# Altium schematic symbol library UCP.SchLib: 378 symbols (part 13 of 14)
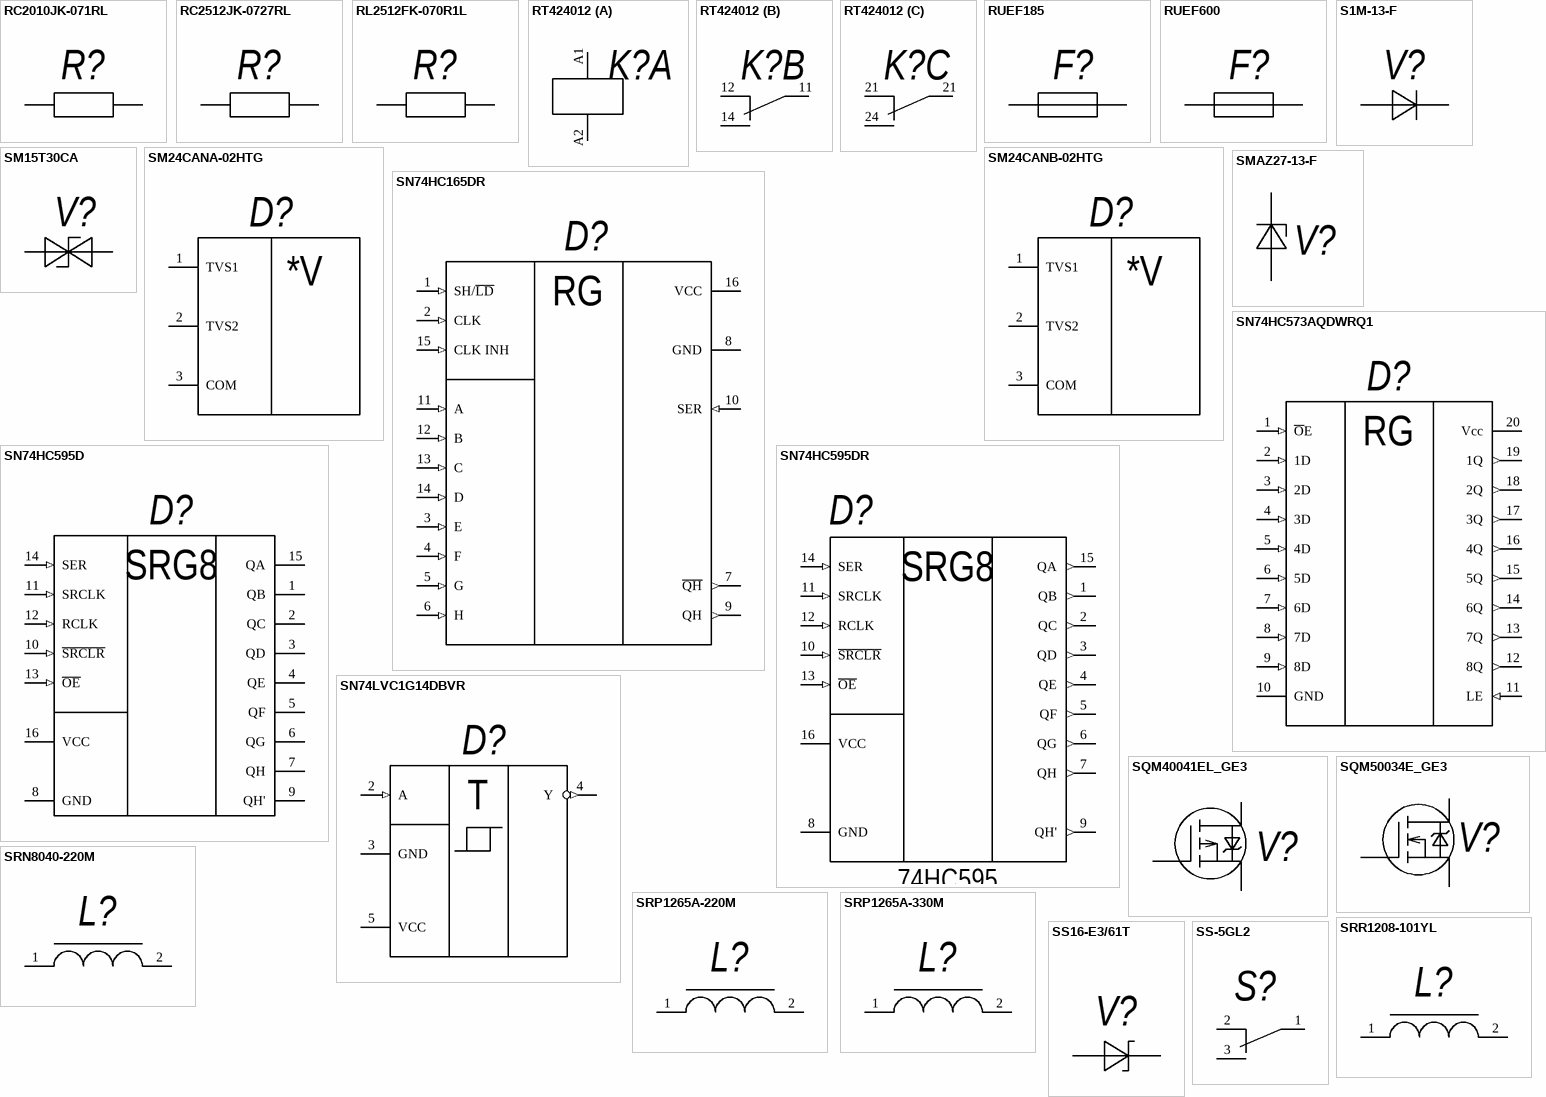
[diagram p36: symbols RC2010JK-071RL to SS-5GL2]

## SRR1208-101YL
designator L?  (value not drawn)
Shielded High Power Inductors / 100 uH, 1,5 A; Type: Катушка индуктивности; Supplier 1: Digi-Key; Supplier Part Number 1: SRR1208-101YLCT-ND; Case/Package: SMD-2; Mount: SMT; Value: SRR1208
footprint INDM1270X1270X850L230X500N (Inductor, Molded Body; 12.70 mm L X 12.70 mm W X 8.50 mm H body)
pins: 1 "Назначение вывода", 2 "Назначение вывода"

## SS16-E3/61T
designator V?  (value not drawn)
Surface-Mount Schottky Barrier Rectifier; Value: SS16; Supplier 1: Digi-Key; Supplier 2: Mouser; Supplier Part Number 1: SS16-E3/61TGICT-ND; Supplier Part Number 2: 625-SS16-E3; Case/Package: SMA(DO-214AC); Mount: SMT; Type: Диод
footprint DIOM521X260X220L114X145N (Diode, Molded Body; 4.315 mm L X 2.605 mm W X 2.20 mm H body)
footprint DIOM521X266X229L114X145N (Diode, Molded Body; 4.315 mm L X 2.605 mm W X 2.29 mm H body)
pins: A, C

## SS-5GL2
designator S?  (value not drawn)
Snap Action Switch N.O./N.C. SPDT Simulated Roller Lever Quick Connect 5A 125VAC Screw Mount; Manufacturer 1: Omron; Manufacturer Part Number 1: SS-5GL2T; Supplier 1: Mouser; Supplier Part Number 1: 653-SS-5GL2T; RoHS: Yes; Category: Snap Action / Limit Switches; Stock 1: 135; Pricing 1: 1=3,34000, 10=3,16000, 25=2,87000, 50=2,87000, 100=2,49000, 250=2,39000, 500=2,25000, 1000=2,25000, 10000=2,25000 (USD); ComponentLink1URL: https://datasheet.ciiva.com/2890/ss-1110-2890905.pdf?src-supplier=Digi-Key; ComponentLink1Description: https://datasheet.ciiva.com/2890/ss-1110-2890905.pdf?src-supplier=Digi-Key; ComponentLink2URL: https://datasheet.ciiva.com/8623/ss-1110-8623258.pdf?src-supplier=Avnet; ComponentLink2Description: https://datasheet.ciiva.com/8623/ss-1110-8623258.pdf?src-supplier=Avnet; ComponentLink3URL: https://datasheet.ciiva.com/14143/03572401-14143401.pdf?src-supplier=Distrelec; ComponentLink3Description: https://datasheet.ciiva.com/14143/03572401-14143401.pdf?src-supplier=Distrelec; ComponentLink4URL: https://datasheet.ciiva.com/16178/ss-1110-16178518.pdf?src-supplier=Onlinecomponents.com; ComponentLink4Description: https://datasheet.ciiva.com/16178/ss-1110-16178518.pdf?src-supplier=Onlinecomponents.com; ComponentLink5URL: https://datasheet.ciiva.com/14536/70175363-14536908.pdf?src-supplier=Allied+Electronics; ComponentLink5Description: https://datasheet.ciiva.com/14536/70175363-14536908.pdf?src-supplier=Allied+Electronics; Case/Package: DIP-3; Mount: THT; Type: Контакт концевой; Value: SS-5GL2
footprint OMRON_SS-5GL2
pins: 1 C "Назначение вывода", 2 NC "Назначение вывода", 3 NO "Назначение вывода"

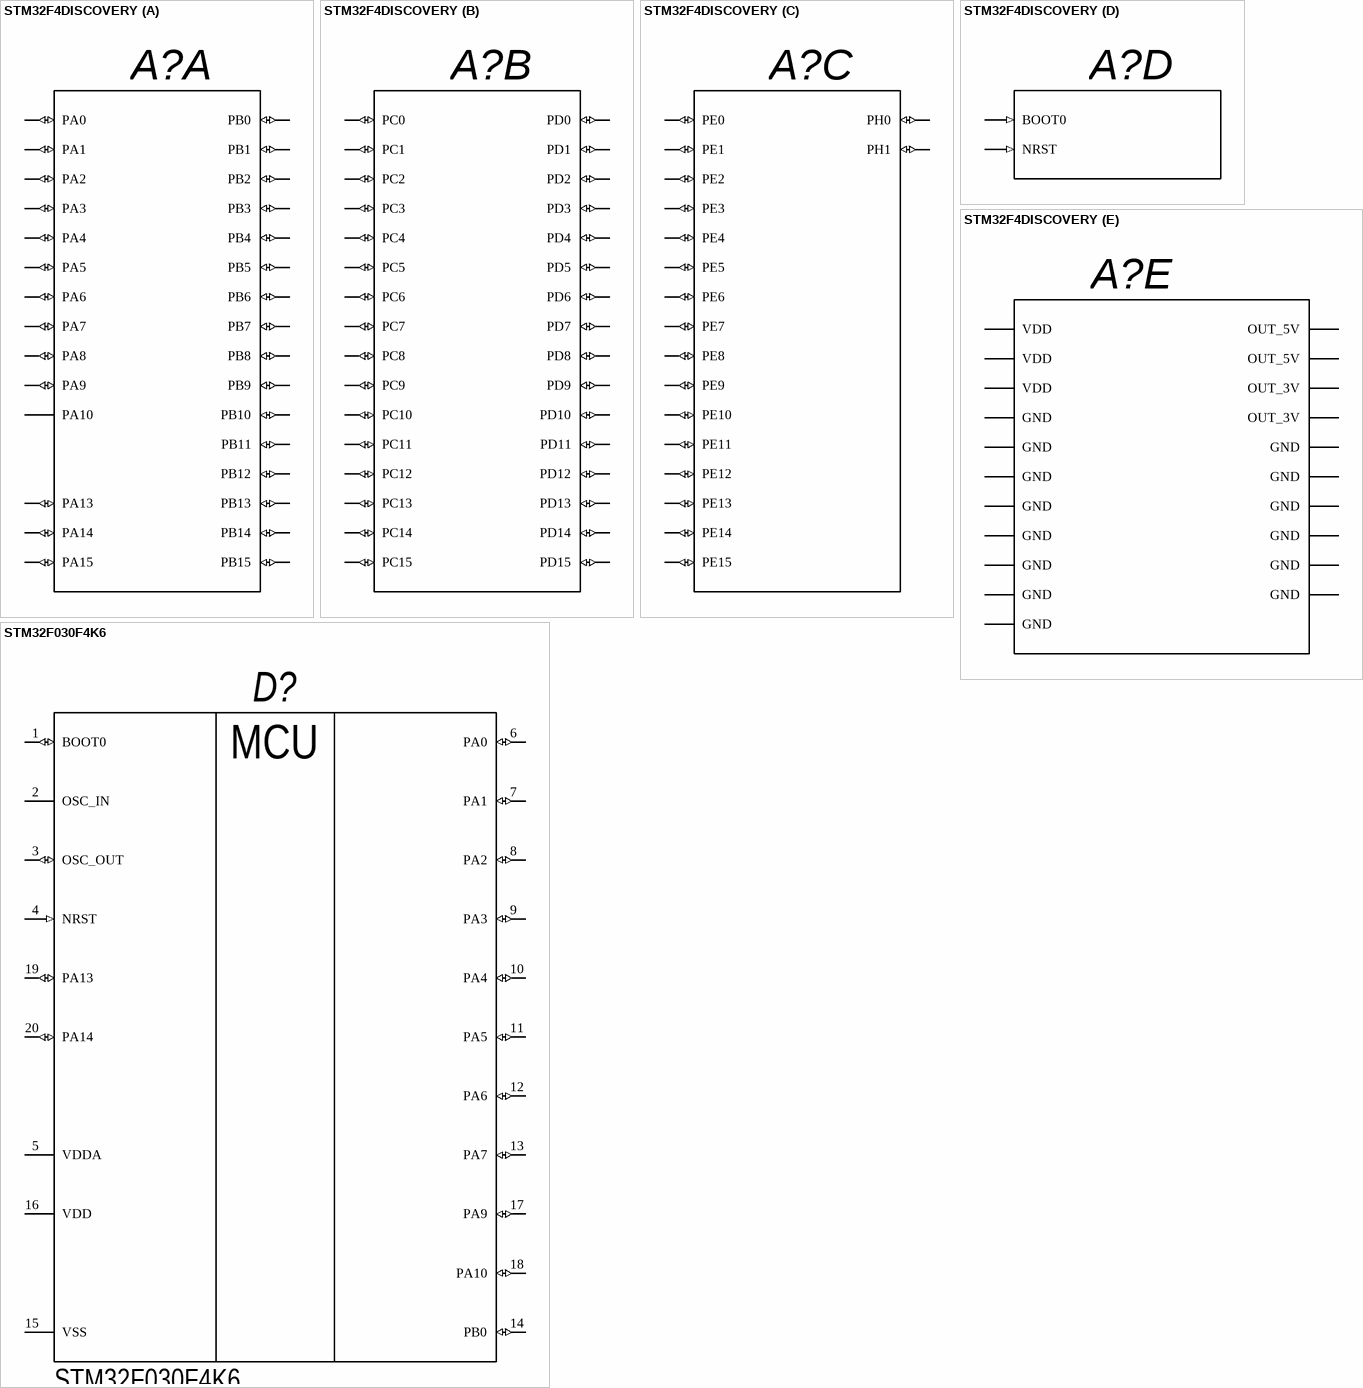
[diagram p21: symbols STM32F4DISCOVERY to STM32F030F4K6]

## STM32F4DISCOVERY
designator A?  (value not drawn)
Discovery kit with STM32F407VG MCU; Supplier 1: Avnet; Supplier Part Number 1: STM32F4DISCOVERY; Case/Package: DIP-80; Mount: THT; Type: Модуль электронный; Value: F4DISCO
footprint STM32F4DISCOVERY
part A pins: P1.11 PA1 (io) "Назначение вывода", P1.12 PA0 (io) "Назначение вывода", P1.13 PA3 (io) "Назначение вывода", P1.14 PA2 (io) "Назначение вывода", P1.15 PA5 (io) "Назначение вывода", P1.16 PA4 (io) "Назначение вывода", P1.17 PA7 (io) "Назначение вывода", P1.18 PA6 (io) "Назначение вывода", P1.21 PB1 (io) "Назначение вывода", P1.22 PB0 (io) "Назначение вывода", P1.24 PB2 (io) "Назначение вывода", P1.34 PB10 (io) "Назначение вывода", P1.35 PB11 (io) "Назначение вывода", P1.36 PB12 (io) "Назначение вывода", P1.37 PB13 (io) "Назначение вывода", P1.38 PB14 (io) "Назначение вывода", P1.39 PB15 (io) "Назначение вывода", P2.19 PB8 (io) "Назначение вывода", P2.20 PB9 (io) "Назначение вывода", P2.23 PB6 (io) "Назначение вывода", P2.24 PB7 (io) "Назначение вывода", P2.25 PB4 (io) "Назначение вывода", P2.26 PB5 (io) "Назначение вывода", P2.28 PB3 (io) "Назначение вывода", P2.39 PA14 (io) "Назначение вывода", P2.40 PA15 (io) "Назначение вывода", P2.41 PA10 "Назначение вывода", P2.42 PA13 (io) "Назначение вывода", P2.43 PA8 (io) "Назначение вывода", P2.44 PA9 (io) "Назначение вывода"
part B pins: P1.7 PC1 (io) "Назначение вывода", P1.8 PC0 (io) "Назначение вывода", P1.9 PC3 (io) "Назначение вывода", P1.10 PC2 (io) "Назначение вывода", P1.19 PC5 (io) "Назначение вывода", P1.20 PC4 (io) "Назначение вывода", P1.40 PD8 (io) "Назначение вывода", P1.41 PD9 (io) "Назначение вывода", P1.42 PD10 (io) "Назначение вывода", P1.43 PD11 (io) "Назначение вывода", P1.44 PD12 (io) "Назначение вывода", P1.45 PD13 (io) "Назначение вывода", P1.46 PD14 (io) "Назначение вывода", P1.47 PD15 (io) "Назначение вывода", P2.9 PC14 (io) "Назначение вывода", P2.10 PC15 (io) "Назначение вывода", P2.12 PC13 (io) "Назначение вывода", P2.27 PD7 (io) "Назначение вывода", P2.29 PD5 (io) "Назначение вывода", P2.30 PD6 (io) "Назначение вывода", P2.31 PD3 (io) "Назначение вывода", P2.32 PD4 (io) "Назначение вывода", P2.33 PD1 (io) "Назначение вывода", P2.34 PD2 (io) "Назначение вывода", P2.35 PC12 (io) "Назначение вывода", P2.36 PD0 (io) "Назначение вывода", P2.37 PC10 (io) "Назначение вывода", P2.38 PC11 (io) "Назначение вывода", P2.45 PC8 (io) "Назначение вывода", P2.46 PC9 (io) "Назначение вывода", P2.47 PC6 (io) "Назначение вывода", P2.48 PC7 (io) "Назначение вывода"
part C pins: P1.25 PE7 (io) "Назначение вывода", P1.26 PE8 (io) "Назначение вывода", P1.27 PE9 (io) "Назначение вывода", P1.28 PE10 (io) "Назначение вывода", P1.29 PE11 (io) "Назначение вывода", P1.30 PE12 (io) "Назначение вывода", P1.31 PE13 (io) "Назначение вывода", P1.32 PE14 (io) "Назначение вывода", P1.33 PE15 (io) "Назначение вывода", P2.7 PH0 (io) "Назначение вывода", P2.8 PH1 (io) "Назначение вывода", P2.11 PE6 (io) "Назначение вывода", P2.13 PE4 (io) "Назначение вывода", P2.14 PE5 (io) "Назначение вывода", P2.15 PE2 (io) "Назначение вывода", P2.16 PE3 (io) "Назначение вывода", P2.17 PE0 (io) "Назначение вывода", P2.18 PE1 (io) "Назначение вывода"
part D pins: P1.6 NRST (in) "Назначение вывода", P2.21 BOOT0 (in) "Назначение вывода"
part E pins: JP3.1 GND (power) "Назначение вывода", JP3.2 GND (power) "Назначение вывода", JP4.1 GND (power) "Назначение вывода", JP4.2 GND (power) "Назначение вывода", P1.1 GND (power) "Назначение вывода", P1.2 GND (power) "Назначение вывода", P1.3 VDD (power) "Назначение вывода", P1.4 VDD (power) "Назначение вывода", P1.5 GND (power) "Назначение вывода", P1.23 GND (power) "Назначение вывода", P1.49 GND (power) "Назначение вывода", P1.50 GND (power) "Назначение вывода", P2.1 GND (power) "Назначение вывода", P2.2 GND (power) "Назначение вывода", P2.3 OUT_5V (power) "Назначение вывода", P2.4 OUT_5V (power) "Назначение вывода", P2.5 OUT_3V (power) "Назначение вывода", P2.6 OUT_3V (power) "Назначение вывода", P2.22 VDD (power) "Назначение вывода", P2.49 GND (power) "Назначение вывода", P2.50 GND (power) "Назначение вывода"

## STM32F030F4K6
designator D?
ARM® Cortex®-M0 STM32 F0 Microcontroller IC 32-Bit 48MHz 16KB (16K x 8) FLASH; Manufacturer 1: STMicroelectronics; Manufacturer Part Number 1: STM32F030F4P6; Max Supply Voltage: 3.6V; Interface: I2C,SPI,UART,USART; RAM Size: 4KB; Max Power Dissipation: 182mW; Number of I/Os: 15; Number of Timers/Counters: 5; Min Supply Voltage: 2.4V; Number of ADC Channels: 11; Oscillator Type: Internal; Data Bus Width: 32b; Number of SPI Channels: 1; Watchdog Timer: Yes; Peripherals: POR,PWM,WDT,DMA; Core Architecture: ARM; Number of PWM Channels: 6; ComponentLink1URL: https://datasheet.ciiva.com/29720/dm00088500-29720640.pdf?src-supplier=Digi-Key; ComponentLink1Description: https://datasheet.ciiva.com/29720/dm00088500-29720640.pdf?src-supplier=Digi-Key; ComponentLink2URL: https://datasheet.ciiva.com/24011/dm00088500-490353-24011901.pdf?src-supplier=Mouser; ComponentLink2Description: https://datasheet.ciiva.com/24011/dm00088500-490353-24011901.pdf?src-supplier=Mouser; ComponentLink3URL: https://datasheet.ciiva.com/29987/dm00088500-29987015.pdf?src-supplier=Avnet; ComponentLink3Description: https://datasheet.ciiva.com/29987/dm00088500-29987015.pdf?src-supplier=Avnet; ComponentLink4URL: https://datasheet.ciiva.com/24153/dm00088500-24153277.pdf?src-supplier=Future+Electronics; ComponentLink4Description: https://datasheet.ciiva.com/24153/dm00088500-24153277.pdf?src-supplier=Future+Electronics; ComponentLink5URL: https://datasheet.ciiva.com/46427/1792126-46427291.pdf?src-supplier=Element14; ComponentLink5Description: https://datasheet.ciiva.com/46427/1792126-46427291.pdf?src-supplier=Element14; ComponentLink6URL: https://datasheet.ciiva.com/29987/dm00088500-29987017.pdf?src-supplier=Avnet; ComponentLink6Description: https://datasheet.ciiva.com/29987/dm00088500-29987017.pdf?src-supplier=Avnet; Supplier 1: Rs; Supplier Part Number 1: 7925925P; RoHS 1: Yes; Category: Microcontrollers; Stock 1: 1860; Pricing 1: 100=1,18400, 500=1,04900, 1000=0,82800, 2500=0,77000 (GBP); Case/Package: TSSOP; Number of Pins: 20; Contact Plating: Gold; Weight: 0.006737oz; Min Operating Temperature: -40°C; Max Operating Temperature: 85°C; Package Quantity: 1480; Frequency: 48MHz; Packaging: Rail/Tube; Number of Programmable I/O: 15; Max Frequency: 48MHz; Number of I2C Channels: 1; Memory Type: FLASH; Memory Size: 16KB; Series: STM32F0; Length: 6.6mm; Width: 4.5mm; Height: 1.05mm; Radiation Hardening: No; RoHS Compliant: Yes; Reach SVHC Compliant: Yes; Lead Free: Lead Free; Value: STM32F030F4K6
pins: 1 BOOT0 (io), 2 OSC_IN, 3 OSC_OUT (io), 4 NRST (in), 5 VDDA (power), 6 PA0 (io), 7 PA1 (io), 8 PA2 (io), 9 PA3 (io), 10 PA4 (io), 11 PA5 (io), 12 PA6 (io), 13 PA7 (io), 14 PB0 (io), 15 VSS (power), 16 VDD (power), 17 PA9 (io), 18 PA10 (io), 19 PA13 (io), 20 PA14 (io)
text: MCU

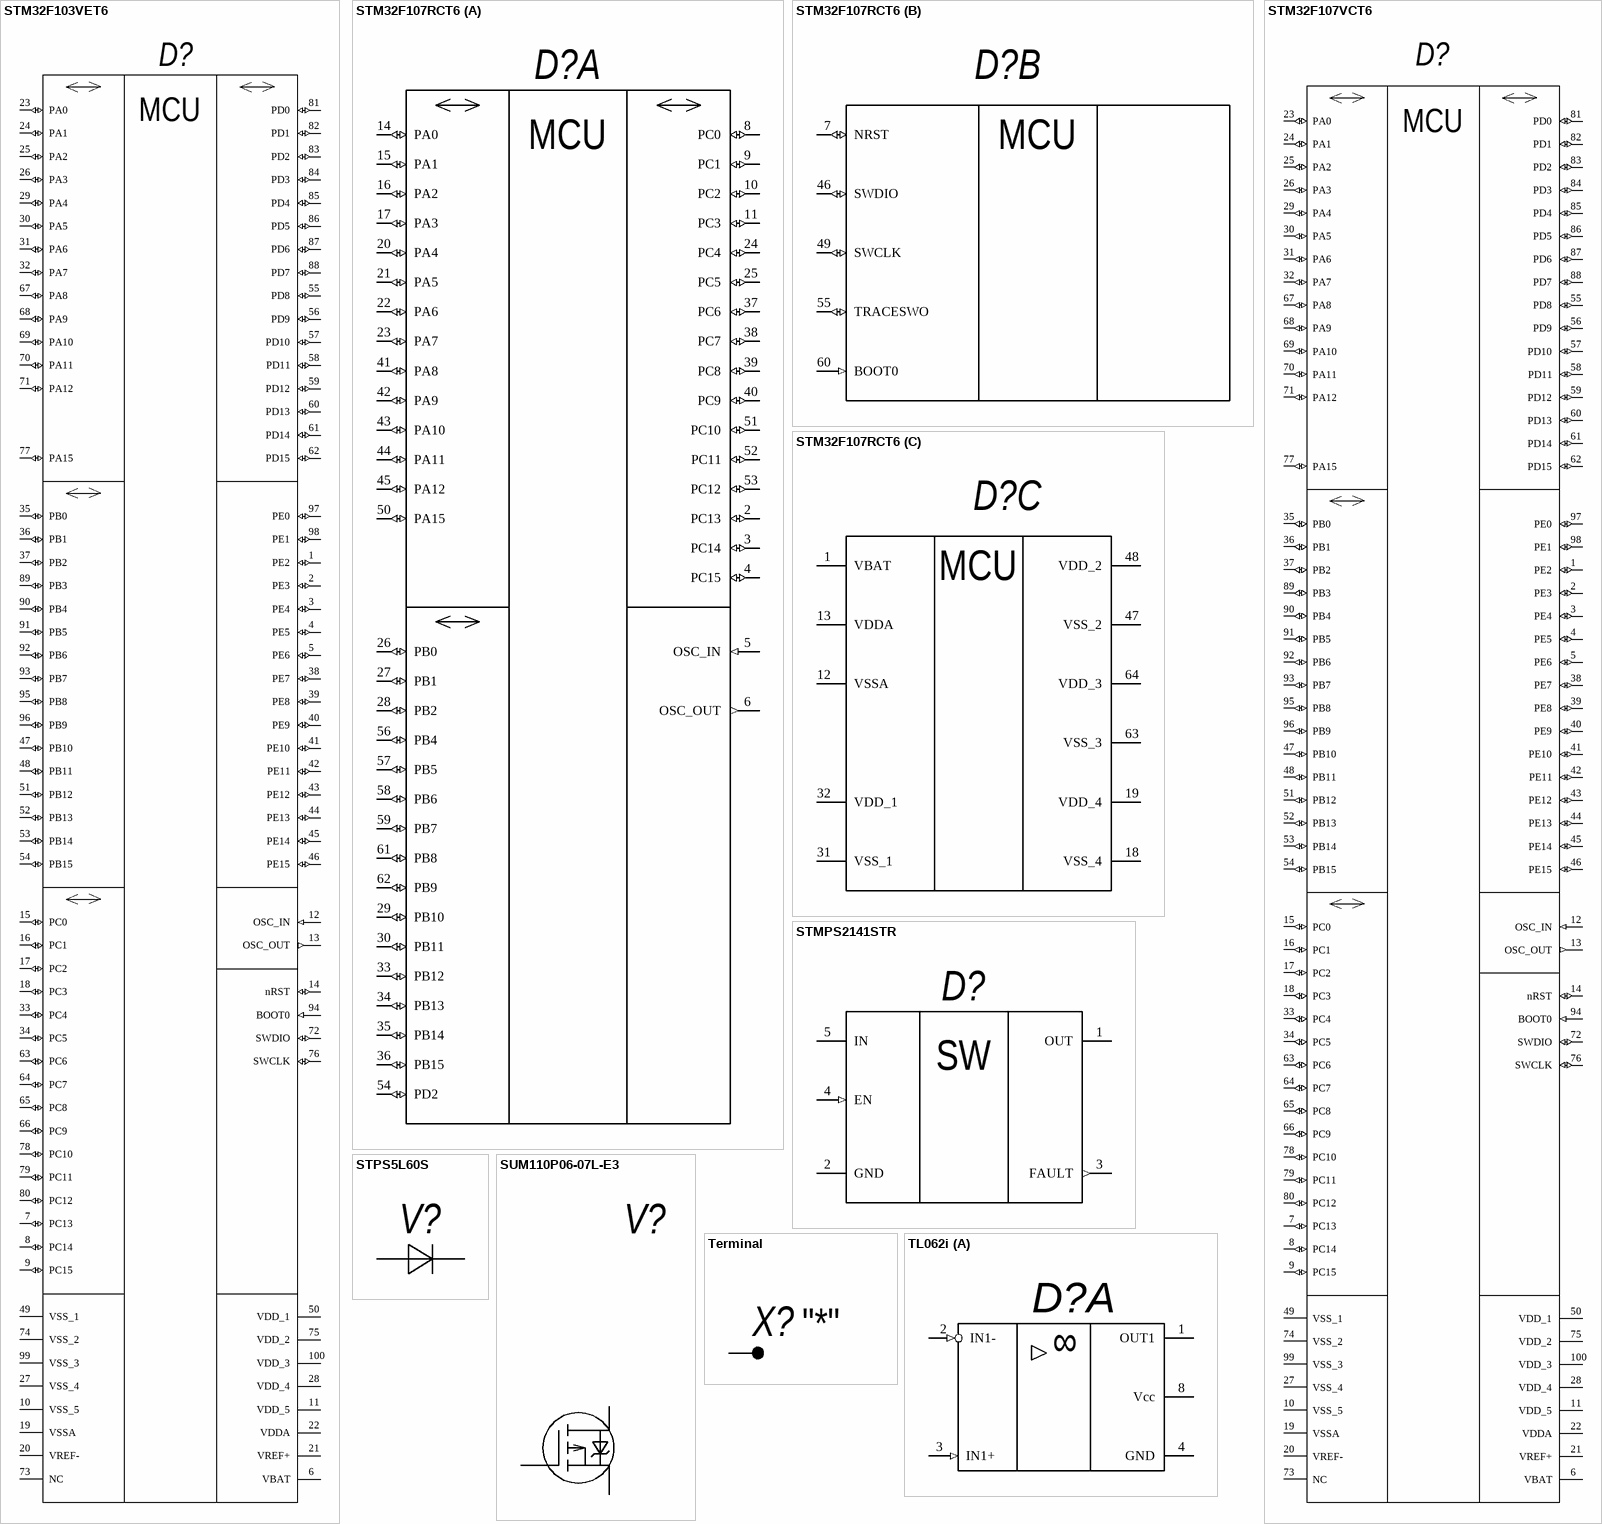
[diagram p22: symbols STM32F103VET6 to TL062i]

## STM32F103VET6
designator D?  (value not drawn)
High-density performance line Arm®-based 32-bit MCU with 256 to 512KB / Flash, USB, CAN, 11 timers, 3 ADCs, 13 communication interfaces; Type: Микросхема; Value: F103; Supplier 1: Newark; Supplier 2: Newark; Supplier 3: Newark; Supplier 4: Newark; Supplier 5: Newark; Supplier Part Number 1: 01P4104; Supplier Part Number 2: 07AH7017; Supplier Part Number 3: 01P4101; Supplier Part Number 4: 30AC0880; Supplier Part Number 5: 73T2309; Case/Package: LQFP-100; Mount: SMT
footprint QFP100P50_1600X1600X160L60X22 (Quad Flat Pack (QFP), 0.50 mm pitch; 100 pin, 14.20 mm L X 14.20 mm W X 1.60 mm H body)
pins: 1 PE2 (io), 2 PE3 (io), 3 PE4 (io), 4 PE5 (io), 5 PE6 (io), 6 VBAT (power) "Vbat", 7 PC13 (io) "PC13/TAMPER-RTC", 8 PC14 (io) "PC14/OSC32_IN", 9 PC15 (io) "PC15/OSC32_OUT", 10 VSS_5 (power), 11 VDD_5 (power), 12 OSC_IN (in), 13 OSC_OUT (out), 14 nRST (io), 15 PC0 (io), 16 PC1 (io), 17 PC2 (io), 18 PC3 (io), 19 VSSA (power), 20 VREF- (power), 21 VREF+ (power), 22 VDDA (power), 23 PA0 (io) "PA0-WKUP", 24 PA1 (io), 25 PA2 (io), 26 PA3 (io), 27 VSS_4 (power), 28 VDD_4 (power), 29 PA4 (io), 30 PA5 (io), 31 PA6 (io), 32 PA7 (io), 33 PC4 (io), 34 PC5 (io), 35 PB0 (io), 36 PB1 (io), 37 PB2 (io), 38 PE7 (io), 39 PE8 (io), 40 PE9 (io), 41 PE10 (io), 42 PE11 (io), 43 PE12 (io), 44 PE13 (io), 45 PE14 (io), 46 PE15 (io), 47 PB10 (io), 48 PB11 (io), 49 VSS_1 (power), 50 VDD_1 (power), 51 PB12 (io), 52 PB13 (io), 53 PB14 (io), 54 PB15 (io), 55 PD8 (io), 56 PD9 (io), 57 PD10 (io), 58 PD11 (io), 59 PD12 (io), 60 PD13 (io), 61 PD14 (io), 62 PD15 (io), 63 PC6 (io), 64 PC7 (io), 65 PC8 (io), 66 PC9 (io), 67 PA8 (io), 68 PA9 (io), 69 PA10 (io), 70 PA11 (io), 71 PA12 (io), 72 SWDIO (io) "PA13/JTMS-SWDIO", 73 NC "No Connection", 74 VSS_2 (power), 75 VDD_2 (power), 76 SWCLK (io) "PA14/JTCK-SWCLK", 77 PA15 (io), 78 PC10 (io), 79 PC11 (io), 80 PC12 (io), 81 PD0 (io), 82 PD1 (io), 83 PD2 (io), 84 PD3 (io), 85 PD4 (io), 86 PD5 (io), 87 PD6 (io), 88 PD7 (io), 89 PB3 (io) "PB3/TRACESWO", 90 PB4 (io), 91 PB5 (io), 92 PB6 (io), 93 PB7 (io), 94 BOOT0 (in), 95 PB8 (io), 96 PB9 (io), 97 PE0 (io), 98 PE1 (io), 99 VSS_3 (power) "VSS_2", 100 VDD_3 (power) "VDD_2"
text: MCU

## STM32F107RCT6
designator D?  (value not drawn)
Connectivity line, ARM®-based 32-bit MCU with 64/256 KB Flash, USBOTG, Ethernet, 10 timers, 2 CANs, 2 ADCs, 14 communication interfaces; Type: Микросхема; Value: F107; Supplier 1: Digi-Key; Supplier 2: Digi-Key; Supplier 3: Mouser; Supplier 4: Digi-Key; Supplier Part Number 1: 497-8914-ND; Supplier Part Number 2: 497-18995-1-ND; Supplier Part Number 3: 511-STM32F103R4T6A; Supplier Part Number 4: 497-18525-ND; Case/Package: LQFP-64; Mount: SMT
footprint QFP64P50_1200X1200X160L60X22N (Quad Flat Pack (QFP), 0.50 mm pitch; square, 16 pin X 16 pin, 10.00 mm L X 10.00 mm W X 1.60 mm H body)
footprint QFP64P50_1200X1200X160L60X22N_V2 (Quad Flat Pack (QFP), 0.50 mm pitch; square, 16 pin X 16 pin, 10.00 mm L X 10.00 mm W X 1.60 mm H body)
part A pins: 2 PC13 (io) "PC13/TAMPER-RTC", 3 PC14 (io) "PC14/OSC32_IN", 4 PC15 (io) "PC15/OSC32_OUT", 5 OSC_IN (in), 6 OSC_OUT (out), 8 PC0 (io), 9 PC1 (io), 10 PC2 (io), 11 PC3 (io), 14 PA0 (io) "PA0-WKUP", 15 PA1 (io), 16 PA2 (io), 17 PA3 (io), 20 PA4 (io), 21 PA5 (io), 22 PA6 (io), 23 PA7 (io), 24 PC4 (io), 25 PC5 (io), 26 PB0 (io), 27 PB1 (io), 28 PB2 (io), 29 PB10 (io), 30 PB11 (io) "PB10", 33 PB12 (io), 34 PB13 (io), 35 PB14 (io), 36 PB15 (io), 37 PC6 (io), 38 PC7 (io), 39 PC8 (io), 40 PC9 (io), 41 PA8 (io), 42 PA9 (io), 43 PA10 (io), 44 PA11 (io), 45 PA12 (io), 50 PA15 (io), 51 PC10 (io), 52 PC11 (io), 53 PC12 (io), 54 PD2 (io), 56 PB4 (io), 57 PB5 (io), 58 PB6 (io), 59 PB7 (io), 61 PB8 (io), 62 PB9 (io)
part B pins: 7 NRST (io), 46 SWDIO (io) "PA13/JTMS-SWDIO", 49 SWCLK (io) "PA14/JTCK-SWCLK", 55 TRACESWO (io) "PB3/TRACESWO", 60 BOOT0 (in)
part C pins: 1 VBAT (power) "Vbat", 12 VSSA (power), 13 VDDA (power), 18 VSS_4 (power), 19 VDD_4 (power), 31 VSS_1 (power), 32 VDD_1 (power), 47 VSS_2 (power), 48 VDD_2 (power), 63 VSS_3 (power) "VSS_2", 64 VDD_3 (power) "VDD_2"
part A text: MCU
part B text: MCU
part C text: MCU

## STM32F107VCT6
designator D?  (value not drawn)
Connectivity line, ARM®-based 32-bit MCU with 64/256 KB Flash, USB / OTG, Ethernet, 10 timers, 2 CANs, 2 ADCs, 14 communication interfaces; Type: Микросхема; Value: F107; Supplier 1: Newark; Supplier 2: Newark; Supplier 3: Newark; Supplier 4: Avnet; Supplier 5: Newark; Supplier Part Number 1: 28AC3347; Supplier Part Number 2: 54AH6945; Supplier Part Number 3: 26R3017; Supplier Part Number 4: 75X0288; Supplier Part Number 5: 82AC0136; Case/Package: LQFP-100; Mount: SMT
footprint QFP100P50_1600X1600X160L60X22 (Quad Flat Pack (QFP), 0.50 mm pitch; 100 pin, 14.20 mm L X 14.20 mm W X 1.60 mm H body)
pins: 1 PE2 (io), 2 PE3 (io), 3 PE4 (io), 4 PE5 (io), 5 PE6 (io), 6 VBAT (power) "Vbat", 7 PC13 (io) "PC13/TAMPER-RTC", 8 PC14 (io) "PC14/OSC32_IN", 9 PC15 (io) "PC15/OSC32_OUT", 10 VSS_5 (power), 11 VDD_5 (power), 12 OSC_IN (in), 13 OSC_OUT (out), 14 nRST (io), 15 PC0 (io), 16 PC1 (io), 17 PC2 (io), 18 PC3 (io), 19 VSSA (power), 20 VREF- (power), 21 VREF+ (power), 22 VDDA (power), 23 PA0 (io) "PA0-WKUP", 24 PA1 (io), 25 PA2 (io), 26 PA3 (io), 27 VSS_4 (power), 28 VDD_4 (power), 29 PA4 (io), 30 PA5 (io), 31 PA6 (io), 32 PA7 (io), 33 PC4 (io), 34 PC5 (io), 35 PB0 (io), 36 PB1 (io), 37 PB2 (io), 38 PE7 (io), 39 PE8 (io), 40 PE9 (io), 41 PE10 (io), 42 PE11 (io), 43 PE12 (io), 44 PE13 (io), 45 PE14 (io), 46 PE15 (io), 47 PB10 (io), 48 PB11 (io), 49 VSS_1 (power), 50 VDD_1 (power), 51 PB12 (io), 52 PB13 (io), 53 PB14 (io), 54 PB15 (io), 55 PD8 (io), 56 PD9 (io), 57 PD10 (io), 58 PD11 (io), 59 PD12 (io), 60 PD13 (io), 61 PD14 (io), 62 PD15 (io), 63 PC6 (io), 64 PC7 (io), 65 PC8 (io), 66 PC9 (io), 67 PA8 (io), 68 PA9 (io), 69 PA10 (io), 70 PA11 (io), 71 PA12 (io), 72 SWDIO (io) "PA13/JTMS-SWDIO", 73 NC "No Connection", 74 VSS_2 (power), 75 VDD_2 (power), 76 SWCLK (io) "PA14/JTCK-SWCLK", 77 PA15 (io), 78 PC10 (io), 79 PC11 (io), 80 PC12 (io), 81 PD0 (io), 82 PD1 (io), 83 PD2 (io), 84 PD3 (io), 85 PD4 (io), 86 PD5 (io), 87 PD6 (io), 88 PD7 (io), 89 PB3 (io) "PB3/TRACESWO", 90 PB4 (io), 91 PB5 (io), 92 PB6 (io), 93 PB7 (io), 94 BOOT0 (in), 95 PB8 (io), 96 PB9 (io), 97 PE0 (io), 98 PE1 (io), 99 VSS_3 (power) "VSS_2", 100 VDD_3 (power) "VDD_2"
text: MCU

## STMPS2141STR
designator D?  (value not drawn)
Enhanced single channel power switches; Type: Микросхема; Supplier 1: Digi-Key; Supplier Part Number 1: 497-6933-1-ND; Case/Package: SOT-23-5; Mount: SMT; Value: STMPS2141
footprint SOT23-5P95_280X145L45X40N (Small Outline Transistor (SOT23), 0.95 mm pitch; 5 pin, 2.90 mm L X 1.60 mm W X 1.45 mm H body)
pins: 1 OUT (power) "Output of power switch", 2 GND (power) "Ground", 3 FAULT (out) "Open drain FAULT indicator, active low", 4 EN (in) "Enable for power switch", 5 IN (power) "2.7 - 5.5 V input"
text: SW

## STPS5L60S
designator V?  (value not drawn)
5 A - 60 V power Schottky rectifier; Value: 0; Supplier 1: Digi-Key; Supplier Part Number 1: 497-8487-1-ND; Case/Package: SMC(DO-214AC); Mount: SMT; Type: Диод
footprint DIOM794X590X262L114X305M (Diode, Molded Body; 6.855 mm L X 5.905 mm W X 2.62 mm H body)
pins: A, C

## SUM110P06-07L-E3
designator V?  (value not drawn)
Power Field-Effect Transistor, 110A I(D), 60V, 0.0069ohm, 1-Element, P-Channel, Silicon, Metal-oxide Semiconductor FET, TO-263AB; Manufacturer 1: Vishay Siliconix; Rise Time: 160ns; Rds On Max: 6.9mR; Input Capacitance: 11.4nF; Number of Elements: 1; Max Power Dissipation: 3.75W; Nominal Vgs: -3V; Gate to Source Voltage (Vgs): 20V; Fall Time: 240ns; Turn-Off Delay Time: 200ns; Drain to Source Voltage (Vdss): -60V; Turn-On Delay Time: 20ns; Element Configuration: Single; Value: SUM110; Supplier 1: RSComponents; Supplier Part Number 1: 7105060; Manufacturer Part Number 1: SUM110P06-07L-E3; RoHS: Yes; Category: MOSFETs; Stock 1: 1; Pricing 1: 5=4,08600, 40=3,15600, 200=2,59500, 400=2,51100 (USD); Mount: SMT; Case/Package: TO-263; Number of Pins: 3; Weight: 0.068654oz; Min Operating Temperature: -55°C; Max Operating Temperature: 175°C; Packaging: Tape and Reel; Package Quantity: 800; Continuous Drain Current (ID): 110A; Drain to Source Resistance: 6.9mR; Threshold Voltage: -3V; Power Dissipation: 3.75W; Number of Channels: 1; On-State Resistance: 6.9MR; Length: 10.41mm; Width: 9.65mm; Height: 4.83mm; Radiation Hardening: No; REACH SVHC: Unknown; Lead Free: Lead Free; Type: Транзистор
footprint DPAK3P508_1524X482L179X74T741X1041M (D2PAK, 5.08 mm pitch; 3 pin, 9.015 mm L X 10.16 mm W X 4.83 mm H body)
pins: 1 G, 2 S, 3 D

## Terminal
designator X?  Marck-2: "*"  (hidden comment: Terminal)  (no BOM)
Монтажное отверстие; Value: 0; Marck-1: *; Case/Package: DIP-1; Mount: THT; Type: Отверстие монтажное
footprint MTGP400H150 (Mounting Hole, Plated; 4.00 mm Pad, 1.50 mm Hole)
footprint MTGP450H200 (Mounting Hole, Plated; 4.50 mm Pad, 2.00 mm Hole)
footprint MTGP200H110 (Mounting Hole, Plated; 2.0 mm Pad, 1.10 mm Hole)
footprint MTGP200H150 (Mounting Hole, Plated; 2.00 mm Pad, 1.50 mm Hole)
footprint MTGP250H150 (Mounting Hole, Plated; 2.50 mm Pad, 1.50 mm Hole)
pins: 1

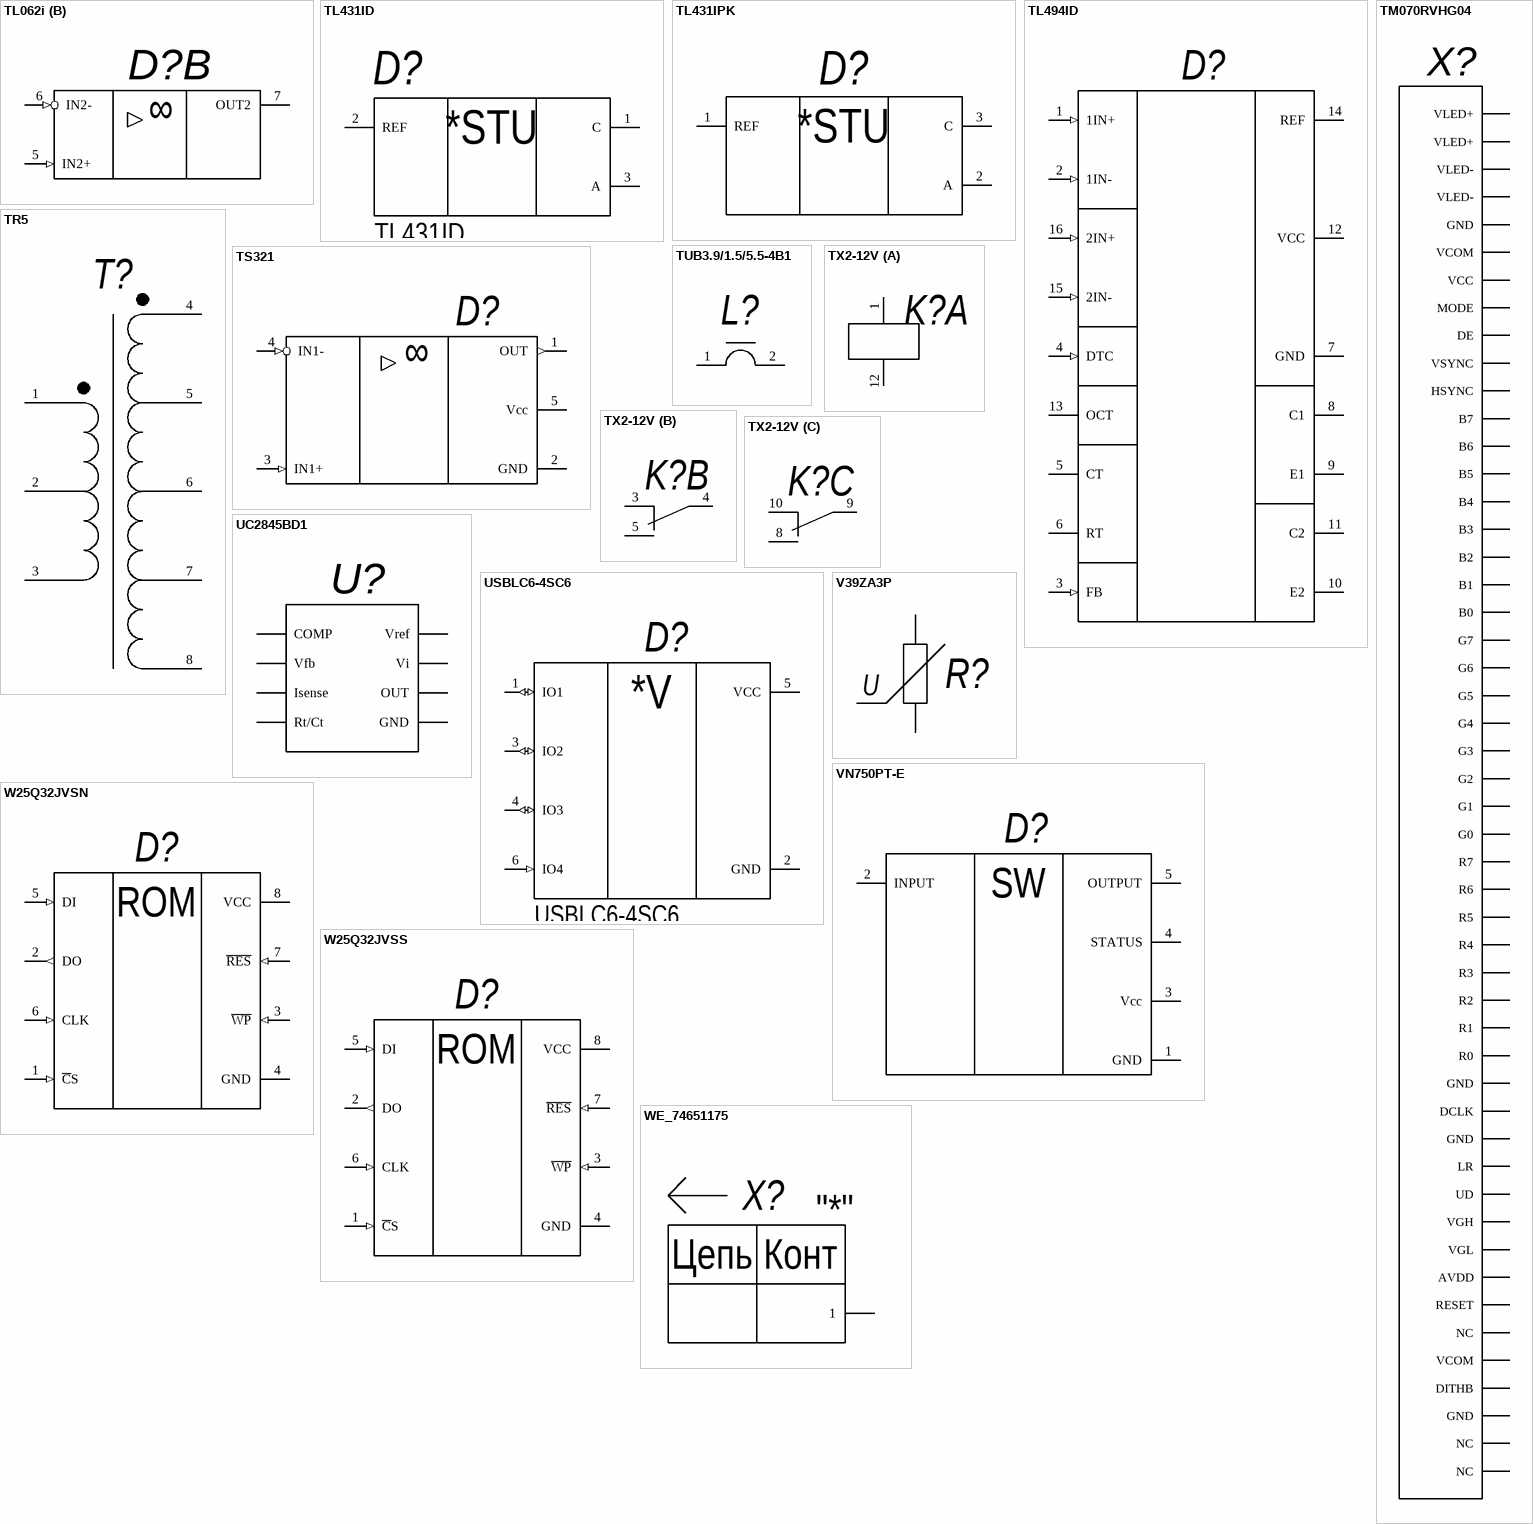
[diagram p23: symbols TL062i to WE_74651175]

## TL062i
designator D?, comment TL062ID  (value not drawn)
Dual Low-Power JFET-Input General-Purpose Operational Amplifier 8-SOIC -40 to 85; Manufacturer 1: Texas Instruments; Manufacturer Part Number 1: TL062IP; Bandwidth: 1MHz; Min Dual Supply Voltage: 3.5V; Max Dual Supply Voltage: 18V; Voltage Gain: 75.56dB; Dual Supply Voltage: 9V; Nominal Supply Current: 500uA; Common Mode Rejection Ratio: 80dB; Number of Channels: 2; Slew Rate: 3.5V/µs; Max I/O Voltage: 6mV; Input Offset Voltage (Vos): 3mV; Input Bias Current: 200pA; Operating Supply Current: 200uA; Type: Микросхема; Value: TL062; RoHS: Yes; Category: Amplifiers - Op Amps, Buffer, Instrumentation; Stock 1: 1181; Pricing 1: 1=0,98000, 10=0,86400, 25=0,81160, 100=0,66240, 250=0,61528, 500=0,52364, 1000=0,43225 (USD); Case/Package: SOIC-8-150; Number of Pins: 8; Min Operating Temperature: -40°C; Max Operating Temperature: 85°C; Unity Gain Bandwidth Product: 1MHz; Packaging: Rail/Tube; Package Quantity: 50; Nominal Gain Bandwidth Product: 1MHz; Gain Bandwidth Product: 1MHz; Number of Circuits: 2; Number of Elements: 2; Operating Supply Voltage: 18V; Number of Amplifiers: 2; Max Supply Current: 500uA; Length: 9.81mm; Width: 6.35mm; Height: 4.57mm; Radiation Hardening: No; Lead Free: Lead Free; RoHS Compliant: Yes; REACH SVHC: No SVHC; ComponentLink1URL: https://datasheet.ciiva.com/27051/1063193-27051334.pdf?src-supplier=Jameco; ComponentLink1Description: https://datasheet.ciiva.com/27051/1063193-27051334.pdf?src-supplier=Jameco; ComponentLink2URL: https://datasheet.ciiva.com/7738/1768032-7738657.pdf?src-supplier=Element14; ComponentLink2Description: https://datasheet.ciiva.com/7738/1768032-7738657.pdf?src-supplier=Element14; ComponentLink3URL: https://datasheet.ciiva.com/14151/tl06x-series-eng-tds-14151159.pdf?src-supplier=Distrelec; ComponentLink3Description: https://datasheet.ciiva.com/14151/tl06x-series-eng-tds-14151159.pdf?src-supplier=Distrelec; ComponentLink4URL: https://datasheet.ciiva.com/1797/tl062a-1797198.pdf?src-supplier=Digi-Key; ComponentLink4Description: https://datasheet.ciiva.com/1797/tl062a-1797198.pdf?src-supplier=Digi-Key; Manufacturer 2: Texas Instruments; Manufacturer Part Number 2: TL062ID; Stock 2: 9100; Pricing 2: 1=1,40000, 10=1,25400, 25=1,19000, 100=0,97760, 250=0,91388, 500=0,80762, 1000=0,70175 (USD); Contact Plating: Gold; Max Supply Voltage: 18V; ComponentLink5URL: https://datasheet.ciiva.com/15129/getdatasheetpartid-40375-15129693.pdf?src-supplier=Verical; ComponentLink5Description: https://datasheet.ciiva.com/15129/getdatasheetpartid-40375-15129693.pdf?src-supplier=Verical; ComponentLink6URL: https://datasheet.ciiva.com/1797/tl062a-1797276.pdf?src-supplier=Digi-Key; ComponentLink6Description: https://datasheet.ciiva.com/1797/tl062a-1797276.pdf?src-supplier=Digi-Key; ComponentLink7URL: https://datasheet.ciiva.com/7738/1634178-7738543.pdf?src-supplier=Element14; ComponentLink7Description: https://datasheet.ciiva.com/7738/1634178-7738543.pdf?src-supplier=Element14; ComponentLink8URL: https://datasheet.ciiva.com/2974/tl062-2974181.pdf?src-supplier=Avnet; ComponentLink8Description: https://datasheet.ciiva.com/2974/tl062-2974181.pdf?src-supplier=Avnet; ComponentLink9URL: https://datasheet.ciiva.com/48712/001011491-da-01-en-ic-opamp-jfet-1mhz-du-tl062id-soic-8-tid-48712330.pdf?src-supplier=Conrad; ComponentLink9Description: https://datasheet.ciiva.com/48712/001011491-da-01-en-ic-opamp-jfet-1mhz-du-tl062id-soic-8-tid-48712330.pdf?src-supplier=Conrad; Supplier 1: Digi-Key; Mount: SMT
footprint SOIC8P127_490X600X175L83X42N (Small Outline IC (SOIC), 1.27 mm pitch; 8 pin, 4.905 mm L X 3.90 mm W X 1.75 mm H body)
footprint SOIC8P127_490X600X175L65X42N (Small Outline IC (SOIC), 1.27 mm pitch; 8 pin, 4.905 mm L X 3.90 mm W X 1.75 mm H body)
part A pins: 1 OUT1 (oc) "Выход 1", 2 IN1- (in), 3 IN1+ (in) "Назначение вывода", 4 GND (power), 8 Vcc (power) "Назначение вывода"
part B pins: 5 IN2+ (in) "Назначение вывода", 6 IN2- (in) "Назначение вывода", 7 OUT2 "Назначение вывода"
part A text: ∞
part B text: ∞

## TL431ID
designator D?
Precision Programmable Reference; Manufacturer 1: Texas Instruments; Type: Микросхема; Output Voltage: 36V; Temperature Coefficient: 92ppm/°C; Reference Type: Shunt,Adjustable; Max Input Voltage: 37V; Tolerance: 2%; Cathode Current: 1mA; Output Current: 100mA; Number of Channels: 1; Min Output Voltage: 2.5V; Case/Package: SOT-23-3; Mount: SMT; Supplier 1: Rs; Supplier Part Number 1: 5171949P; Manufacturer Part Number 1: TL431ID; RoHS 1: Yes; Category: Voltage References; Stock 1: 15; Pricing 1: 20=58,20100, 200=23,17100 (RUB); Number of Pins: 8; Weight: 0.002561oz; Min Operating Temperature: -40°C; Max Operating Temperature: 125°C; Packaging: Rail/Tube; Package Quantity: 75; Max Output Voltage: 36V; Max Output Current: 100mA; Series: -; Reference Voltage: 36V; Current Rating: 100mA; Length: 4.9mm; Width: 3.91mm; Height: 1.58mm; Radiation Hardening: No; RoHS Compliant: Yes; Lead Free: Lead Free; Reach SVHC Compliant: Yes; ComponentLink1URL: https://datasheet.ciiva.com/3235/tl432b-3235628.pdf?src-supplier=Avnet; ComponentLink1Description: https://datasheet.ciiva.com/3235/tl432b-3235628.pdf?src-supplier=Avnet; ComponentLink2URL: https://datasheet.ciiva.com/2011/tl431a-2011335.pdf?src-supplier=Digi-Key; ComponentLink2Description: https://datasheet.ciiva.com/2011/tl431a-2011335.pdf?src-supplier=Digi-Key; Value: TL431ID
footprint SOT23-3P95_240X110L30X43N (Small Outline Transistor (SOT23), 0.95 mm pitch; 3 pin, 2.90 mm L X 1.30 mm W X 1.10 mm H body)
pins: 1 C, 2 REF, 3 A
text: *STU

## TL431IPK
designator D?  (value not drawn)
Precision Programmable Reference; Type: Микросхема; Value: TL431; Supplier 1: Digi-Key; Supplier 2: Digi-Key; Supplier 3: Farnell; Supplier 4: Digi-Key; Supplier Part Number 1: 296-10189-1-ND; Supplier Part Number 2: 296-53369-1-ND; Supplier Part Number 3: 9593616RL; Supplier Part Number 4: 296-50581-1-ND; Case/Package: SOT-89; Mount: SMT
footprint SOT89-150P350X160-3N (SOT89, 3-Leads, Body 4,50x2,50mm, Pitch 1,50mm, Lead Span 3,5mm , IPC Medium Density)
pins: 1 REF, 2 A, 3 C
text: *STU

## TL494ID
designator D?  (value not drawn)
Pulse-Width-Modulation Control Circuits 40V 200 mA 300 kHz; Manufacturer 1: Texas Instruments; Description 1: Voltage Mode PWM Controller 40V 200mA 300kHz 16-Pin SOIC Tube; Output Current: 200mA; Switching Frequency: 300kHz; Rise Time: 100ns; Number of Outputs: 2; Max Duty Cycle: 45%; Fall Time: 40ns; Topology: Flyback,Push-Pull; Min Supply Voltage: 7V; Type: Микросхема; Value: TL494; Manufacturer Part Number 1: TL494ID; RoHS: Yes; Category: Voltage Regulators - Switching; Pricing 1: 1=1,26000, 10=1,12600, 25=1,06840, 100=0,87770, 250=0,82044, 500=0,72504, 1000=0,63000 (USD); Case/Package: SOIC-16; Number of Pins: 16; Weight: 0.004998oz; Min Operating Temperature: -40°C; Max Operating Temperature: 85°C; Max Supply Voltage: 40V; Packaging: Rail/Tube; Output Voltage: 40V; Package Quantity: 40; Max Frequency: 300kHz; Duty Cycle: 45%; Frequency: 300kHz; Length: 9.9mm; Width: 3.91mm; Height: 1.58mm; Radiation Hardening: No; Lead Free: Lead Free; RoHS Compliant: Yes; REACH SVHC: No SVHC; ComponentLink1URL: https://datasheet.ciiva.com/15106/getdatasheetpartid-71965-15106746.pdf?src-supplier=Verical; ComponentLink1Description: https://datasheet.ciiva.com/15106/getdatasheetpartid-71965-15106746.pdf?src-supplier=Verical; ComponentLink2URL: https://datasheet.ciiva.com/26891/tl494id-26891288.pdf?src-supplier=IIIC; ComponentLink2Description: https://datasheet.ciiva.com/26891/tl494id-26891288.pdf?src-supplier=IIIC; ComponentLink3URL: https://datasheet.ciiva.com/1513/1829924-1513384.pdf?src-supplier=Element14; ComponentLink3Description: https://datasheet.ciiva.com/1513/1829924-1513384.pdf?src-supplier=Element14; ComponentLink4URL: https://datasheet.ciiva.com/2015/tl494-2015398.pdf?src-supplier=Digi-Key; ComponentLink4Description: https://datasheet.ciiva.com/2015/tl494-2015398.pdf?src-supplier=Digi-Key; ComponentLink5URL: https://datasheet.ciiva.com/26264/tl494-26264254.pdf?src-supplier=Avnet+Europe; ComponentLink5Description: https://datasheet.ciiva.com/26264/tl494-26264254.pdf?src-supplier=Avnet+Europe; Supplier 1: Digi-Key; Supplier Part Number 1: 296-10193-5-ND; Supplier 2: RSComponents; Supplier Part Number 2: 6616875; Mount: SMT
footprint SOIC16P127_990X600X175L83X42N (Small Outline IC (SOIC), 1.27 mm pitch; 16 pin, 9.90 mm L X 3.90 mm W X 1.75 mm H body)
pins: 1 1IN+ (in) "Noninverting input to error amplifier 1", 2 1IN- (in) "Inverting input to error amplifier 1", 3 FB (in) "Input pin for feedback", 4 DTC (in) "Dead-time control comparator input", 5 CT "Capacitor terminal used to set oscillator frequency", 6 RT "Resistor terminal used to set oscillator frequency", 7 GND (power) "Ground", 8 C1 "Collector terminal of BJT output 1", 9 E1 "Emitter terminal of BJT output 1", 10 E2 "Emitter terminal of BJT output 2", 11 C2 "Collector terminal of BJT output 2", 12 VCC (power) "Positive Supply", 13 OCT "Selects single-ended/parallel output or push-pull operation", 14 REF (power) "5-V reference regulator output", 15 2IN- (in) "Inverting input to error amplifier 2", 16 2IN+ (in) "Noninverting input to error amplifier 2"

## TM070RVHG04
designator X?, comment Обозначение при заказе  (value not drawn)
Описание свойств компонента; Value: 0; Case/Package: SMD-50; Mount: SMT; Type: 0
footprint FPC050x50
pins: 1 VLED+ "Назначение вывода", 2 VLED+ "Назначение вывода", 3 VLED- "Назначение вывода", 4 VLED- "Назначение вывода", 5 GND "Назначение вывода", 6 VCOM "Назначение вывода", 7 VCC "Назначение вывода", 8 MODE "Назначение вывода", 9 DE "Назначение вывода", 10 VSYNC "Назначение вывода", 11 HSYNC "Назначение вывода", 12 B7 "Назначение вывода", 13 B6 "Назначение вывода", 14 B5 "Назначение вывода", 15 B4 "Назначение вывода", 16 B3 "Назначение вывода", 17 B2 "Назначение вывода", 18 B1 "Назначение вывода", 19 B0 "Назначение вывода", 20 G7 "Назначение вывода", 21 G6 "Назначение вывода", 22 G5 "Назначение вывода", 23 G4 "Назначение вывода", 24 G3 "Назначение вывода", 25 G2 "Назначение вывода", 26 G1 "Назначение вывода", 27 G0 "Назначение вывода", 28 R7 "Назначение вывода", 29 R6 "Назначение вывода", 30 R5 "Назначение вывода", 31 R4 "Назначение вывода", 32 R3 "Назначение вывода", 33 R2 "Назначение вывода", 34 R1 "Назначение вывода", 35 R0 "Назначение вывода", 36 GND "Назначение вывода", 37 DCLK "Назначение вывода", 38 GND "Назначение вывода", 39 LR "Назначение вывода", 40 UD "Назначение вывода", 41 VGH "Назначение вывода", 42 VGL "Назначение вывода", 43 AVDD "Назначение вывода", 44 RESET "Назначение вывода", 45 NC "Назначение вывода", 46 VCOM "Назначение вывода", 47 DITHB "Назначение вывода", 48 GND "Назначение вывода", 49 NC "Назначение вывода", 50 NC "Назначение вывода"

## TR5
designator T?, comment Обозначение при заказе  (value not drawn)
Описание свойств компонента; Type: 0; Value: 0; Mount: 0
footprint XFMR (Transformator)
pins: 1 "Назначение вывода", 2 "Назначение вывода", 3 "Назначение вывода", 4 "Назначение вывода", 5 "Назначение вывода", 6 "Назначение вывода", 7 "Назначение вывода", 8 "Назначение вывода"

## TS321
designator D?, comment TS321IDBVR  (value not drawn)
Low-Power Single Operational Amplifier 5-SOT-23 -40 to 125; Manufacturer 1: Texas Instruments; Max Supply Voltage: 30V; Min Supply Voltage: 3V; Min Dual Supply Voltage: 1.5V; Max Dual Supply Voltage: 15V; Voltage Gain: 100dB; Common Mode Rejection Ratio: 65dB; Gain Bandwidth Product: 800kHz; Output Current: 40mA; Nominal Supply Current: 800uA; Number of Channels: 1; Slew Rate: 0.4V/µs; Max I/O Voltage: 4mV; Input Bias Current: 200nA; Operating Supply Current: 600uA; Dual Supply Voltage: 9V; Type: Микросхема; Value: TS321; Supplier 1: Digi-Key; Supplier Part Number 1: 296-21173-6-ND; Manufacturer Part Number 1: TS321IDBVR; RoHS: Yes; Category: Amplifiers - Op Amps, Buffer, Instrumentation; Pricing 1: 1=0,97000, 10=0,85400, 25=0,80160, 100=0,65440, 250=0,60780, 500=0,51728, 1000=0,42700 (USD); Case/Package: SOT-23-5; Number of Pins: 5; Contact Plating: Tin,Matte; Min Operating Temperature: -40°C; Max Operating Temperature: 125°C; Package Quantity: 1; Operating Supply Voltage: 15V; Unity Gain Bandwidth Product: 800kHz; Nominal Gain Bandwidth Product: 800kHz; Number of Circuits: 1; Input Offset Voltage (Vos): 4mV; Output Current per Channel: 40mA; Packaging: Tape and Reel; Number of Elements: 1; Bandwidth: 800kHz; Number of Amplifiers: 1; Length: 2.9mm; Width: 1.6mm; Height: 1.15mm; Radiation Hardening: No; Lead Free: Lead Free; RoHS Compliant: Yes; REACH SVHC: No SVHC; ComponentLink1URL: https://datasheet.ciiva.com/1796/ts321-1796096.pdf?src-supplier=Digi-Key; ComponentLink1Description: https://datasheet.ciiva.com/1796/ts321-1796096.pdf?src-supplier=Digi-Key; ComponentLink2URL: https://datasheet.ciiva.com/1796/ts321-1796095.pdf?src-supplier=Digi-Key; ComponentLink2Description: https://datasheet.ciiva.com/1796/ts321-1796095.pdf?src-supplier=Digi-Key; ComponentLink3URL: https://datasheet.ciiva.com/1796/ts321-1796097.pdf?src-supplier=Digi-Key; ComponentLink3Description: https://datasheet.ciiva.com/1796/ts321-1796097.pdf?src-supplier=Digi-Key; Mount: SMT
footprint SOT23-5P95_280X145L45X40N (Small Outline Transistor (SOT23), 0.95 mm pitch; 5 pin, 2.90 mm L X 1.60 mm W X 1.45 mm H body)
pins: 1 OUT (out) "Выход 1", 2 GND (power), 3 IN1+ (in) "Назначение вывода", 4 IN1- (in), 5 Vcc (power) "Назначение вывода"
1 alternate drawing of the same symbol
text: ∞

## TUB3.9/1.5/5.5-4B1
designator L?  (value not drawn)
EMI-Suppression; Type: Бусина ферритовая; Value: TUB3.9; Supplier 1: Farnell; Supplier Part Number 1: 242482; Case/Package: DIP-2; Mount: THT
footprint TUB3.9/1.5/5.5-4B1 (Ferrite Bead TUB3.9/1.5/5.5-4B1)
pins: 1 "Назначение вывода", 2 "Назначение вывода"

## TX2-12V
designator K?  (value not drawn)
Electromechanical Relay DPDT 7.5A 12VDC 1.028KOhm Through Hole; Manufacturer 1: Panasonic; Manufacturer Part Number 1: TX2-12V-TH; Coil Current: 11.7mA; Coil Resistance: 1.028kR; Coil Voltage (DC): 12V; Max Voltage Rating (DC): 220V; Coil Type: Non-Latching; Contact Current Rating: 2A; Operate Time: 4ms; Coil Power: 140mW; Relay Type: General Purpose; Max Voltage Rating (AC): 250V; Value: TX2-12; Supplier 1: Mouser; Supplier Part Number 1: 769-TX2-12V-TH; RoHS: Yes; Category: Signal Relays; Stock 1: 5; Pricing 1: 1=4,00000, 10=3,76000, 25=3,34000, 50=3,34000, 100=3,34000, 120=3,18000, 280=3,01000, 520=2,68000, 1000=2,36000, 5000=2,26000, 10000=2,36000 (USD); Mount: THT; Case/Package: DIP-8; Number of Pins: 8; Contact Material: Gold,Silver; Weight: 2g; Min Operating Temperature: -40°C; Max Operating Temperature: 85°C; Package Quantity: 40; Packaging: Rail/Tube; Throw Configuration: DPDT; Max Current Rating: 7.5A; Termination: PC Pin; Release Time: 4ms; Series: TX-TH; Voltage Rating (AC): 250V; Length: 15mm; Depth: 7.4mm; Lead Free: Lead Free; RoHS Compliant: Yes; ComponentLink1URL: https://datasheet.ciiva.com/2413/tx-relays-th-type-2413250.pdf?src-supplier=Digi-Key; ComponentLink1Description: https://datasheet.ciiva.com/2413/tx-relays-th-type-2413250.pdf?src-supplier=Digi-Key; Type: Реле
footprint PANASONIC_TX2-12V
part A pins: 1 3 "Вывод обмотки", 12 "Вывод обмотки"
part B pins: 3 "Назначение вывода", 4 "Назначение вывода", 5 "Назначение вывода"
part C pins: 8 "Назначение вывода", 9 "Назначение вывода", 10 "Назначение вывода"

## UC2845BD1
designator U?  (value not drawn)
Off-Line Controllers 52kHz 1A Current PWM No-Cancel/No-Return; Manufacturer 1: STMicroelectronics; Max Frequency: 500kHz; Duty Cycle: 50%; Fall Time: 50ns; Topology: Boost,Flyback; Output Voltage: 5.05V; Number of Outputs: 1; Max Supply Voltage: 30V; Power Dissipation: 800mW; Min Supply Voltage: 12V; Frequency: 250kHz; Operating Supply Current: 12mA; Value: UC2845; ComponentLink1Description: New link; ComponentLink1URL: https://www.st.com/content/st_com/en/products/power-management/ac-dc-converters/pwm-controllers/uc2845b.html; Supplier 1: RSComponents; Manufacturer Part Number 1: UC2845BD1; RoHS: Yes; Category: Voltage Regulators - Switching; Stock 1: 110; Pricing 1: 10=0,89500, 100=0,57700, 500=0,55000, 1000=0,42000, 2000=0,37600, 10=0,64400, 100=0,41500, 500=0,39600, 1000=0,30200, 2000=0,27100 (USD); Mount: SMT; Case/Package: SOIC-8-150; Number of Pins: 8; Min Operating Temperature: -25°C; Max Operating Temperature: 150°C; Max Duty Cycle: 50%; Output Current: 1A; Packaging: Rail/Tube; Switching Frequency: 500kHz; Rise Time: 50ns; Package Quantity: 100; Length: 5mm; Width: 4mm; Height: 1.25mm; Radiation Hardening: No; REACH SVHC: No SVHC; ComponentLink2URL: https://datasheet.ciiva.com/15108/getdatasheetpartid-98542-15108162.pdf?src-supplier=Verical; ComponentLink2Description: https://datasheet.ciiva.com/15108/getdatasheetpartid-98542-15108162.pdf?src-supplier=Verical; ComponentLink3URL: https://datasheet.ciiva.com/4877/cd00000966-4877081.pdf?src-supplier=Mouser; ComponentLink3Description: https://datasheet.ciiva.com/4877/cd00000966-4877081.pdf?src-supplier=Mouser; ComponentLink4URL: https://datasheet.ciiva.com/1513/1696818-1513147.pdf?src-supplier=Element14; ComponentLink4Description: https://datasheet.ciiva.com/1513/1696818-1513147.pdf?src-supplier=Element14; Type: Микросхема
footprint SOIC8P127_490X600X175L83X42N (Small Outline IC (SOIC), 1.27 mm pitch; 8 pin, 4.905 mm L X 3.90 mm W X 1.75 mm H body)
footprint SOIC8P127_490X600X175L65X42N (Small Outline IC (SOIC), 1.27 mm pitch; 8 pin, 4.905 mm L X 3.90 mm W X 1.75 mm H body)
pins: 1 COMP "Назначение вывода", 2 Vfb "Назначение вывода", 3 Isense "Назначение вывода", 4 Rt/Ct "Назначение вывода", 5 GND "Назначение вывода", 6 OUT "Назначение вывода", 7 Vi "Назначение вывода", 8 Vref "Назначение вывода"

## USBLC6-4SC6
designator D?
Very low capacitance ESD protection; Type: Микросхема; Case/Package: SOT-23-6; Mount: SMT; Supplier 1: Future Electronics; Supplier Part Number 1: 7131158; Value: USBLC6-4SC6
footprint SOT23-6P95_280X145L45X40N (Small Outline Transistor (SOT23), 0.95 mm pitch; 6 pin, 2.90 mm L X 1.60 mm W X 1.45 mm H body)
pins: 1 IO1 (io), 2 GND (power), 3 IO2 (io), 4 IO3 (io), 5 VCC (power), 6 IO4 (in)
text: *V

## V39ZA3P
designator R?  (value not drawn)
ZA Series - Low to Medium Voltage Radial Leaded Varistor, 350A, disc 10mm, RoHS; Manufacturer 1: Littelfuse; Number of Terminals/Pins: 2; Max Surge Current: 500A; Max Voltage Rating (AC): 25V; Max Voltage Rating (DC): 31V; Number of Circuits: 1; Energy: 3J; Min Varistor Voltage: 35.1V; Varistor Voltage: 43V; Max Varistor Voltage: 42.9V; Capacitance: 3.1nF; Voltage Rating: 615V; Clamping Voltage: 76V; Clamping Current: 5A; Insulation Resistance: 1GR; Value: V39; Supplier 1: Newark; Supplier Part Number 1: 58K7543; Manufacturer Part Number 1: V39ZA3P; RoHS: Yes; Category: Varistors; Stock 1: 2354; Pricing 1: 1=0,60000, 10=0,45800, 25=0,41000, 50=0,36100, 100=0,31200, 500=0,28300, 1000=0,25400, 2500=0,22000 (USD); Mount: THT; Case/Package: DIP-2; Min Operating Temperature: -55°C; Max Operating Temperature: 85°C; Packaging: Bulk; Package Quantity: 1000; Series: ZA; Max Output Current: 500A; Voltage Rating (DC): 31V; Voltage Rating (AC): 25V; Current Rating: 500A; Termination: Radial; Lead/Base Style: Radial; Clamping Voltage-Max: 76V; Diameter: 10mm; Width: 12.5mm; Lead Pitch: 8.5mm; Depth: 5mm; RoHS Compliant: Yes; REACH SVHC: No SVHC; Lead Free: Lead Free; ComponentLink1URL: https://datasheet.ciiva.com/15155/getdatasheetpartid-28439-15155239.pdf?src-supplier=Verical; ComponentLink1Description: https://datasheet.ciiva.com/15155/getdatasheetpartid-28439-15155239.pdf?src-supplier=Verical; ComponentLink2URL: https://datasheet.ciiva.com/365/littelfuse-mov-za-365400.pdf?src-supplier=Digi-Key; ComponentLink2Description: https://datasheet.ciiva.com/365/littelfuse-mov-za-365400.pdf?src-supplier=Digi-Key; ComponentLink3URL: https://datasheet.ciiva.com/8071/447919-8071068.pdf?src-supplier=Element14; ComponentLink3Description: https://datasheet.ciiva.com/8071/447919-8071068.pdf?src-supplier=Element14; Type: Варистор
footprint VARRBO750W80L1250T500H1600
pins: 1, 2
text: U

## VN750PT-E
designator D?  (value not drawn)
STMICROELECTRONICS - VN750PT-E - MOSFET Driver High Side, 5.5V-36V supply, 6A peak out, 0.06 Ohm output, PPAK-5; Number of Outputs: 1; Max Supply Voltage: 36V; Min Supply Voltage: 5.5V; Max Power Dissipation: 60W; Max Supply Current: 3.5mA; Nominal Supply Current: 2mA; Operating Supply Voltage: 13V; Turn-Off Delay Time: 30000ns; Turn-On Delay Time: 40000ns; On-State Resistance: 60mR; Type: Микросхема; Value: VN750; Supplier 1: Digi-Key; Manufacturer 1: STMicroelectronics; Manufacturer Part Number 1: VN750PT-E; RoHS: Yes; Category: Hot Swap Controllers; Pricing 1: 1=2,82000, 10=2,53000, 25=2,38640, 100=2,03310, 250=1,90904, 500=1,67042, 1000=1,57588 (USD); Mount: SMT; Case/Package: PG-TO-252-5; Number of Pins: 5; Weight: 0.01lb; Min Operating Temperature: -40°C; Max Operating Temperature: 150°C; Max Output Current: 6A; Package Quantity: 75; Packaging: Rail/Tube; Output Current: 6A; Number of Drivers: 1; Output Current per Channel: 6A; Power Dissipation: 60W; Supply Current: 2mA; Series: VIPower™; Length: 6.6mm; Width: 6.2mm; Height: 2.4mm; Radiation Hardening: No; REACH SVHC: No SVHC; Lead Free: Lead Free; RoHS Compliant: Yes; ComponentLink1URL: https://datasheet.ciiva.com/15109/getdatasheetpartid-31633-15109808.pdf?src-supplier=Verical; ComponentLink1Description: https://datasheet.ciiva.com/15109/getdatasheetpartid-31633-15109808.pdf?src-supplier=Verical; ComponentLink2URL: https://datasheet.ciiva.com/7981/cd00044424-7981962.pdf?src-supplier=Element14; ComponentLink2Description: https://datasheet.ciiva.com/7981/cd00044424-7981962.pdf?src-supplier=Element14; ComponentLink3URL: https://datasheet.ciiva.com/1956/cd00044424-1956395.pdf?src-supplier=Digi-Key; ComponentLink3Description: https://datasheet.ciiva.com/1956/cd00044424-1956395.pdf?src-supplier=Digi-Key; Supplier Part Number 1: 497-19725-ND
footprint DPAK5P127P972X240L100x50T510x470 (D-PAK, 5-Pads, Body 6,30x6,66mm (max), IPC Medium Density)
pins: 1 GND (power), 2 INPUT, 3 Vcc (power), 4 STATUS, 5 OUTPUT
text: SW

## W25Q32JVSN
designator D?, comment W25Q32JVSNIQ  (value not drawn)
3V 32M-BIT SERIAL FLASH MEMORY WITH DUAL, QUAD SPI; Type: Микросхема; Value: W25Q32; Supplier 1: Arrow Electronics; Supplier Part Number 1: W25Q32JVSNIQ; Case/Package: SOIC-8-150; Mount: SMT
footprint SOIC8P127_490X600X175L83X42N (Small Outline IC (SOIC), 1.27 mm pitch; 8 pin, 4.905 mm L X 3.90 mm W X 1.75 mm H body)
footprint SOIC8P127_490X600X175L65X42N (Small Outline IC (SOIC), 1.27 mm pitch; 8 pin, 4.905 mm L X 3.90 mm W X 1.75 mm H body)
pins: 1 ~{C}S (in) "Output of power switch", 2 DO (out) "Data Output", 3 ~{WP} (in) "Write Protect Input", 4 GND (power) "Ground", 5 DI (in) "Data Input", 6 CLK (in) "Serial Clock Input", 7 ~{RES} (in) "Hold or Reset Input", 8 VCC (power) "Power Supply"
text: ROM

## W25Q32JVSS
designator D?  (value not drawn)
3V 32M-BIT SERIAL FLASH MEMORY WITH DUAL, QUAD SPI; Type: Микросхема; Value: W25Q32; Supplier 1: Digi-Key; Supplier 2: Digi-Key; Supplier 3: RSComponents; Supplier 4: Arrow Electronics; Supplier 5: RSComponents; Supplier Part Number 1: W25Q32JVSSIQCT-ND; Supplier Part Number 2: W25Q32JVSSIQ-ND; Supplier Part Number 3: 1882528; Supplier Part Number 4: W25Q32JVSSIM TR; Supplier Part Number 5: 1712228; Case/Package: SOIC-8-208; Mount: SMT
footprint SOIC8P127_528X790X100L65X41N (Small Outline IC, 1.27 mm pitch; 8 pin, 5.33 mm L X 5.33 mm W X 2.16 mm H body)
pins: 1 ~{C}S (in) "Output of power switch", 2 DO (out) "Data Output", 3 ~{WP} (in) "Write Protect Input", 4 GND (power) "Ground", 5 DI (in) "Data Input", 6 CLK (in) "Serial Clock Input", 7 ~{RES} (in) "Hold or Reset Input", 8 VCC (power) "Power Supply"
text: ROM

## WE_74651175
designator X?, comment Marck-2: "*"  (hidden comment: 74651175)
Terminal, Shank Thr, Pcb, M5, Th; Manufacturer 1: Wurth Electronics; Manufacturer Part Number 1: 74651175R; Current Rating: 50A; Marck-1: *; Supplier 1: Digi-Key; Supplier Part Number 1: 732-10906-1-ND; RoHS: No; Category: Terminals; Stock 1: 143; Pricing 1: 1=3,26000, 10=3,01200, 50=2,70100, 100=2,44300 (USD); Mount: THT; Number of Pins: 4; Contact Plating: Tin; Contact Material: Brass; Termination: Solder; ComponentLink1URL: https://katalog.we-online.de/em/datasheet/74651175R.pdf?src-supplier=Digi-Key; ComponentLink1Description: https://katalog.we-online.de/em/datasheet/74651175R.pdf?src-supplier=Digi-Key; Case/Package: DIP-4; Type: Шпилька; Value: 74651175
footprint WE_74651175 (WP-THRSH REDCUBE)
pins: 1
text: Цепь; Конт

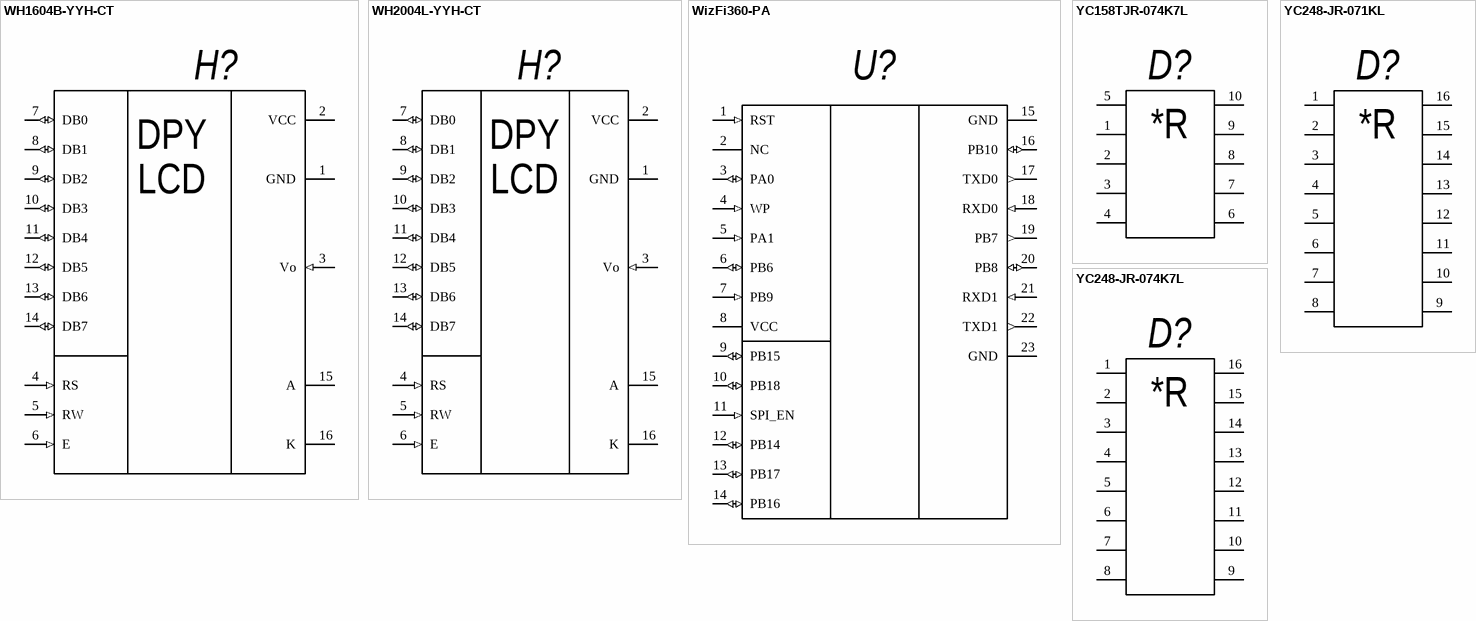
[diagram p24: symbols WH1604B-YYH-CT to YC248-JR-074K7L]

## WH1604B-YYH-CT
designator H?  (value not drawn)
Экран жидкокристаллический; Case/Package: DIP-16 (+MECH-4); Mount: THT; Type: Экран жидкокристаллический; Value: WH1604B
footprint WH1604B-YYH_CT
pins: 1 GND (power) "Земля", 2 VCC (power) "Питание логической части", 3 Vo (in) "Настройка контраста", 4 RS (in) "Выбор информация/инструкции", 5 RW (in) "Выбор чтение или запись", 6 E (in) "Сигнал размещение", 7 DB0 (io) "Шина данных", 8 DB1 (io) "Шина данных", 9 DB2 (io) "Шина данных", 10 DB3 (io) "Шина данных", 11 DB4 (io) "Шина данных", 12 DB5 (io) "Шина данных", 13 DB6 (io) "Шина данных", 14 DB7 (io) "Шина данных", 15 A (power) "Питание подстветки (Анод)", 16 K (power) "Питание подстветки (Катод)"
text: DPY; LCD

## WH2004L-YYH-CT
designator H?  (value not drawn)
Экран жидкокристаллический; Case/Package: DIP-18 (+MECH-4); Mount: THT; Type: Экран жидкокристаллический; Value: WH2004L
footprint WH2004L-YYH-CT
footprint WH2004L-YYH-CT_Height_12mm
pins: 1 GND (power) "Земля", 2 VCC (power) "Питание логической части", 3 Vo (in) "Настройка контраста", 4 RS (in) "Выбор информация/инструкции", 5 RW (in) "Выбор чтение или запись", 6 E (in) "Сигнал размещение", 7 DB0 (io) "Шина данных", 8 DB1 (io) "Шина данных", 9 DB2 (io) "Шина данных", 10 DB3 (io) "Шина данных", 11 DB4 (io) "Шина данных", 12 DB5 (io) "Шина данных", 13 DB6 (io) "Шина данных", 14 DB7 (io) "Шина данных", 15 A (power) "Питание подстветки (Анод)", 16 K (power) "Питание подстветки (Катод)"
text: DPY; LCD

## WizFi360-PA
designator U?  (value not drawn)
Low-cost WiFi module; Supplier 1: Arrow Electronics; Supplier Part Number 1: WIZFI360-PA; Case/Package: SMD-23; Mount: SMT; Type: Модуль электронный; Value: WizFi360
footprint WizFi360 (WiFi 2.4G, 802.11 b/g/n)
pins: 1 RST (in) "Module Reset Pin (Active Low)", 2 NC "Reserved", 3 PA0 (io) "BOOT Pin (Active low)", 4 WP (in) "WAKE-UP Pin (Active High)", 5 PA1 (in) "RESET UART1 to Default (Pull down over 3s for taking effect)", 6 PB6 (io) "This pin can be controlled by AT command", 7 PB9 (in) "CTS Pin of UART1 or PB9", 8 VCC (power) "Power Pin (Typical Value 3.3V)", 9 PB15 (io) "PB15 or CSn Pin of SPI", 10 PB18 (io) "PB18 or MISO Pin of SPI", 11 SPI_EN (in) "Enable Pin of SPI", 12 PB14 (io) "PB14 or INTn Pin of SPI", 13 PB17 (io) "PB17 or MOSI Pin of SPI", 14 PB16 (io) "PB16 or CLK Pin of SPI", 15 GND (power) "Ground Pin", 16 PB10 (io) "PB10 or RTS Pin of UART1", 17 TXD0 (out) "TXD Pin of UART0", 18 RXD0 (in) "RXD Pin of UART0", 19 PB7 (out) "LED Light output", 20 PB8 (io), 21 RXD1 (in) "RXD Pin of UART1", 22 TXD1 (out) "TXD Pin of UART1", 23 GND (power) "Ground (Termal pad)"

## YC158TJR-074K7L
designator D?  (value not drawn)
Резистивная матрица 8 резисторов на общий вывод 4,7 кОм ±5%; Type: Микросхема; Value: 4k7; Supplier 1: Newark; Supplier Part Number 1: 98K8233; Case/Package: 1206; Mount: SMT
footprint RESCAXS10P64_320X160X70L35X32N (Resistor, Chip Array, 2 Side Convex, 0.64 mm pitch; 10 pin, 3.20 mm L X 1.60 mm W X 0.70 mm H body)
pins: 1 R1 "Назначение вывода", 2 R2 "Назначение вывода", 3 R3 "Назначение вывода", 4 R4 "Назначение вывода", 5 COM "Общий вывод", 6 R5 "Назначение вывода", 7 R6 "Назначение вывода", 8 R7 "Назначение вывода", 9 R8 "Назначение вывода", 10 COM "Общий вывод"
text: *R

## YC248-JR-071KL
designator D?  (value not drawn)
Резистивная матрица 8 отдельных резисторов 1 кОм ±5; Number of Terminals/Pins: 16; Resistance: 4.7kR; Number of Resistors: 8; Temperature Coefficient: 200ppm/°C; Tolerance: 5%; Voltage Rating: 50V; Circuit Type: Isolated; Power Per Element: 62.5mW; Type: Микросхема; Value: 1k; Supplier 1: Digi-Key; Supplier Part Number 1: YC248J-1.0KCT-ND; Supplier 2: Farnell; Supplier Part Number 2: 1377057; Manufacturer 2: Yageo; Manufacturer Part Number 2: YC248-JR-074K7L; RoHS 2: Yes; Category: Resistor Arrays; Pricing 2: 10=0,12400, 100=0,05600, 500=0,04500, 1000=0,03400, 2500=0,03150, 5000=0,02900, 25000=0,02800 (EUR); Mount: SMT; Case/Package: 0616; Number of Pins: 16; Case Code (Metric): 1640; Case Code (Imperial): 0616; Min Operating Temperature: -55°C; Max Operating Temperature: 155°C; Number of Elements: 8; Package Quantity: 1; Packaging: Cut Tape; Termination: Convex; Number of Contacts: 16; Number of Circuits: 8; Series: YC248; Technology: THICK FILM; Resistance Tolerance: 5%; Length: 0.157inch; Width: 0.063inch; Height: 0.022inch; Terminal Pitch: 0.5mm; Depth: 1.6mm; Radiation Hardening: No; Military Standard: Not; Lead Free: Lead Free; RoHS Compliant: Yes; ComponentLink1URL: https://datasheet.ciiva.com/2689/pyu-r-marking-2-2689433.pdf?src-supplier=Digi-Key; ComponentLink1Description: https://datasheet.ciiva.com/2689/pyu-r-marking-2-2689433.pdf?src-supplier=Digi-Key; ComponentLink2URL: https://datasheet.ciiva.com/2689/pyu-r-marking-2-2689434.pdf?src-supplier=Digi-Key; ComponentLink2Description: https://datasheet.ciiva.com/2689/pyu-r-marking-2-2689434.pdf?src-supplier=Digi-Key; ComponentLink3URL: https://datasheet.ciiva.com/2689/pyu-r-marking-2-2689435.pdf?src-supplier=Digi-Key; ComponentLink3Description: https://datasheet.ciiva.com/2689/pyu-r-marking-2-2689435.pdf?src-supplier=Digi-Key; ComponentLink4URL: https://datasheet.ciiva.com/8018/443139-8018063.pdf?src-supplier=Element14; ComponentLink4Description: https://datasheet.ciiva.com/8018/443139-8018063.pdf?src-supplier=Element14; ComponentLink5URL: https://datasheet.ciiva.com/8311/pyu-yc248-51-rohs-l-2-8311734.pdf?src-supplier=Avnet; ComponentLink5Description: https://datasheet.ciiva.com/8311/pyu-yc248-51-rohs-l-2-8311734.pdf?src-supplier=Avnet; ComponentLink6URL: https://datasheet.ciiva.com/8018/443139-8018062.pdf?src-supplier=Element14; ComponentLink6Description: https://datasheet.ciiva.com/8018/443139-8018062.pdf?src-supplier=Element14
footprint RESCAXS16P50_400X160X55L40X30N (Resistor, Chip Array, 2 Side Convex, 0.50 mm pitch; 16 pin, 4.00 mm L X 1.60 mm W X 0.55 mm H body)
footprint RESCAXS16P50_400X160X55L40X30N_V2 (Resistor, Chip Array, 2 Side Convex, 0.50 mm pitch; 16 pin, 4.00 mm L X 1.60 mm W X 0.55 mm H body)
footprint RESCAXS16P50_400X160X55L40X30N_V3 (Resistor, Chip Array, 2 Side Convex, 0.50 mm pitch; 16 pin, 4.00 mm L X 1.60 mm W X 0.55 mm H body)
pins: 1 R1.1 "Назначение вывода", 2 R2.1 "Назначение вывода", 3 R3.1 "Назначение вывода", 4 R4.1 "Назначение вывода", 5 R5.1 "Общий вывод", 6 R6.1 "Назначение вывода", 7 R7.1 "Назначение вывода", 8 R8.1 "Назначение вывода", 9 R8.2 "Назначение вывода", 10 R7.2 "Общий вывод", 11 R6.2 "Общий вывод", 12 R5.2 "Общий вывод", 13 R4.2 "Общий вывод", 14 R3.2 "Общий вывод", 15 R2.2 "Общий вывод", 16 R1.2 "Назначение вывода"
text: *R